# Altium schematic symbol library Centralize.SchLib: 1081 symbols (part 1 of 26)
Pins are listed as number, name and electrical type; pins without a type are passive.

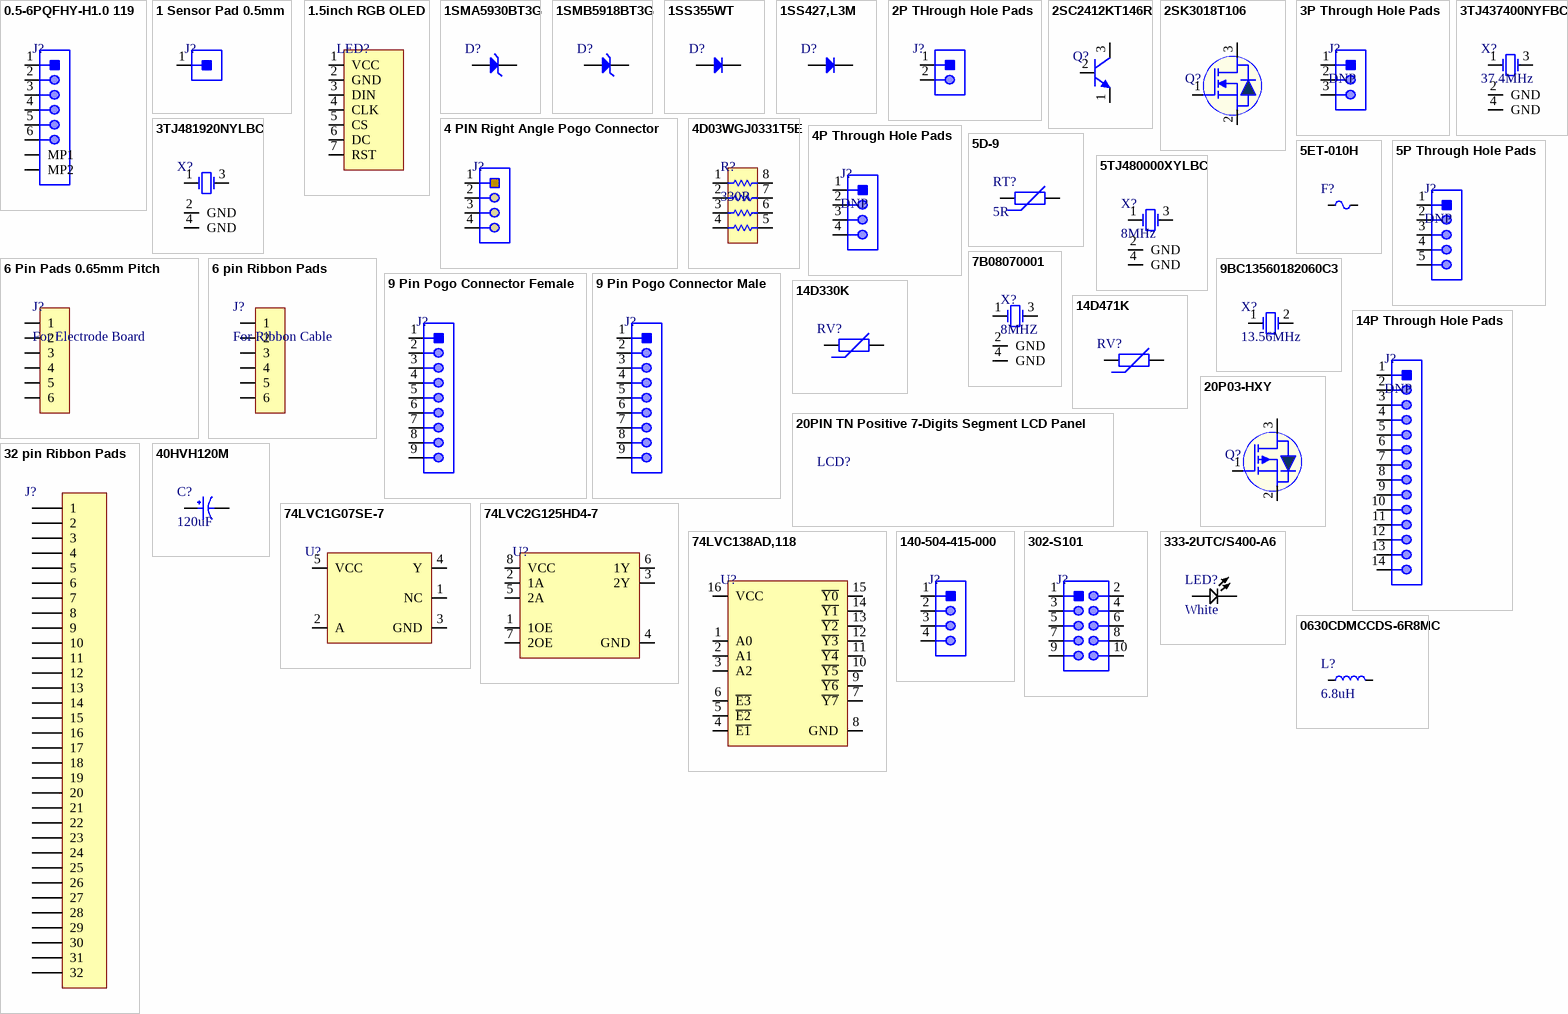
[diagram p0: symbols 0.5-6PQFHY-H1.0 119 to 0630CDMCCDS-6R8MC]

## 0.5-6PQFHY-H1.0 119
designator J?
Slide Lock -25℃~+85℃ 6 Double-sided contacts/up and down connection Surface Mount 0.5mm SMD,P=0.5mm FFC/FPC Connectors ROHS; Manufacturer: SHOU HAN; Manufacturer Part Number: 0.5-6PQFHY-H1.0 119; Package: SMD,P=0.5mm; LCSC Part Number: C2858296; Item Type: Connector; ComponentLink1Description: LCSC; ComponentLink1URL: https://www.lcsc.com/product-detail/FFC-span-style-background-color-ff0-FPC-span-Connectors_SHOU-HAN-0-5-6PQFHY-H1-0-119_C2858296.html
footprint 0.5-6PQFHY-H1.0 119
pins: 1, 2, 3, 4, 5, 6, MP1, MP2

## 1 Sensor Pad 0.5mm
designator J?
Wire Connecting Pad 0.5mm; Manufacturer Part Number: 1 Sensor Pad 0.5mm; Item Type: SMD Pad
footprint 1 Sensor Pad 0.5mm
pins: 1

## 1.5inch RGB OLED
designator LED?
1.5inch (128×128) SPI RGB OLED Display Module; Manufacturer: Waveshare; Manufacturer Part Number: 1.5inch RGB OLED Module; Item Type: OLED Module; Package: Custom; LCSC Part Number: *; ComponentLink1Description: Waveshare; ComponentLink1URL: https://www.waveshare.com/product/ai/1.5inch-rgb-oled-module.htm
footprint 1.5inch RGB OLED
pins: 1 VCC, 2 GND, 3 DIN, 4 CLK, 5 CS, 6 DC, 7 RST 

## 1SMA5930BT3G
designator D?
DIODE ZENER 16V 1.5W SMA; Manufacturer: onsemi; Manufacturer Part Number: 1SMA5930BT3G; Item Type: Zener diode; Package: SMA; LCSC Part Number: C128848; ComponentLink1Description: LCSC; ComponentLink1URL: https://www.lcsc.com/product-detail/Zener-Diodes_onsemi-1SMA5930BT3G_C128848.html
footprint SMA
pins: 1 K, 2 A

## 1SMB5918BT3G
designator D?
DIODE ZENER 5.1V 3W SMB; Manufacturer: ON Semiconductor; Manufacturer Part Number: 1SMB5918BT3G; Material: Plastic; Forward Voltage: 1.5V; Tolerance: 5%; Impedance: 4R; Max Reverse Leakage Current: 5uA; Zener Current: 294mA; Element Configuration: Single; Breakdown Voltage: 5.36V; Power Dissipation: 550mW; Test Current: 73.5mA; ESD Protection: Yes; Supplier 1: Digi-Key; RoHS: Yes; Category: Zener Diodes; Pricing 1: 1=0.47000, 10=0.35700, 100=0.22230, 500=0.15214, 1000=0.11702 (USD); Case/Package: SMB; Pins: 2; Contact Plating: Tin,Matte; Min Operating Temperature: -65°C; Max Operating Temperature: 150°C; Packaging: Tape and Reel; Max Power Dissipation: 3W; Package Quantity: 2500; Zener Voltage: 5.1V; Voltage Tolerance: 5%; Max Reverse Current: 5uA; Voltage Rating (DC): 5.1V; Power Rating: 3W; Series: -; Working Voltage: 5.1V; Length: 4.32mm; Width: 3.56mm; Height: 2.13mm; Radiation Hardening: No; Lead Free: Lead Free; Halogen Free: Halogen Free; Reach SVHC Compliant: Yes; RoHS Compliant: Yes; ComponentLink1URL: https://datasheet.ciiva.com/43573/1308322-43573724.pdf?src-supplier=Jameco; ComponentLink1Description: https://datasheet.ciiva.com/43573/1308322-43573724.pdf?src-supplier=Jameco; ComponentLink2URL: https://datasheet.ciiva.com/1182/1smb5913bt3-d-1182656.pdf?src-supplier=Element14; ComponentLink2Description: https://datasheet.ciiva.com/1182/1smb5913bt3-d-1182656.pdf?src-supplier=Element14; ComponentLink3URL: https://datasheet.ciiva.com/1182/1smb5913bt3-d-1182655.pdf?src-supplier=Element14; ComponentLink3Description: https://datasheet.ciiva.com/1182/1smb5913bt3-d-1182655.pdf?src-supplier=Element14; ComponentLink4URL: https://datasheet.ciiva.com/15198/getdatasheetpartid-301256-15198694.pdf?src-supplier=Verical; ComponentLink4Description: https://datasheet.ciiva.com/15198/getdatasheetpartid-301256-15198694.pdf?src-supplier=Verical; ComponentLink5URL: https://datasheet.ciiva.com/895/1smb5913bt3-d-895174.pdf?src-supplier=Digi-Key; ComponentLink5Description: https://datasheet.ciiva.com/895/1smb5913bt3-d-895174.pdf?src-supplier=Digi-Key; ComponentLink6URL: https://datasheet.ciiva.com/895/1smb5913bt3-d-895175.pdf?src-supplier=Digi-Key; ComponentLink6Description: https://datasheet.ciiva.com/895/1smb5913bt3-d-895175.pdf?src-supplier=Digi-Key; ComponentLink7URL: https://datasheet.ciiva.com/895/1smb5913bt3-d-895173.pdf?src-supplier=Digi-Key; ComponentLink7Description: https://datasheet.ciiva.com/895/1smb5913bt3-d-895173.pdf?src-supplier=Digi-Key; ComponentLink8URL: https://datasheet.ciiva.com/28461/1571994-28461349.pdf?src-supplier=Element14; ComponentLink8Description: https://datasheet.ciiva.com/28461/1571994-28461349.pdf?src-supplier=Element14; ComponentLink9URL: https://datasheet.ciiva.com/14559/70099466-14559627.pdf?src-supplier=Allied+Electronics; ComponentLink9Description: https://datasheet.ciiva.com/14559/70099466-14559627.pdf?src-supplier=Allied+Electronics; Supplier Part Number 1: 1SMB5918BT3GOSDKR-ND; LCSC Part Number: C142361; Item Type: Diode
footprint SMB_
pins: 1 A, 2 K

## 1SS355WT
designator D?
80V Single 1.2V@100mA 4ns 100mA SOD-523 Switching Diode ROHS; Manufacturer: CBI; Manufacturer Part Number: 1SS355WT; Package: SOD-523; LCSC Part Number: C2836063; Item Type: Diode; ComponentLink1Description: LCSC; ComponentLink1URL: https://www.lcsc.com/product-detail/Switching-Diode_CBI-1SS355WT_C2836063.html
footprint SOD-523 (SOD-523 Schottky Barrier Diodes (SBD) ROHS)
pins: 1 A, 2 K

## 1SS427,L3M
designator D?
DIODE GEN PURP 80V 100MA SOD923; Manufacturer: Toshiba; Manufacturer Part Number: 1SS427,L3M; Reverse Recovery Time: 1.6ns; Max Repetitive Reverse Voltage (Vrrm): 85V; Peak Non-Repetitive Surge Current: 1A; Item Type: Switching Diode; Supplier 1: Arrow Electronics; RoHS: Yes; Category: Rectifier Diodes; Stock 1: 22801; Pricing 1: 1=0.2509, 10=0.2033, 25=0.2013, 100=0.1061, 250=0.105, 500=0.0686, 1000=0.0432, 3000=0.0383, 6000=0.0352, 15000=0.0296 (USD); Mounting Technology: Surface Mount; Case/Package: SOD; Min Operating Temperature: -55°C; Max Operating Temperature: 150°C; Packaging: Cut Tape; Forward Current: 100mA; Average Rectified Current: 100mA; Max Reverse Voltage (DC): 80V; Series: -; RoHS Compliant: Yes; ComponentLink1URL: http://www.mouser.com/ds/2/408/1SS427_datasheet_en_20140708-708354.pdf?src-supplier=Mouser; ComponentLink1Description: http://www.mouser.com/ds/2/408/1SS427_datasheet_en_20140708-708354.pdf?src-supplier=Mouser; ComponentLink2URL: https://toshiba.semicon-storage.com/info/docget.jsp?did=11149&prodName=1SS427&src-supplier=Digi-Key; ComponentLink2Description: https://toshiba.semicon-storage.com/info/docget.jsp?did=11149&prodName=1SS427&src-supplier=Digi-Key; ComponentLink3URL: https://www.toshiba.com/taec/components2/datasheet_Sync/200802/DST_1SS427-TDE_EN_27790.pdf?src-supplier=Avnet; ComponentLink3Description: https://www.toshiba.com/taec/components2/datasheet_Sync/200802/DST_1SS427-TDE_EN_27790.pdf?src-supplier=Avnet; Supplier Part Number 1: 1SS427,L3M; LCSC Part Number: C146351
footprint SOD-923.
pins: 1 K, 2 A

## 2P THrough Hole Pads
designator J?
Wire Connecting Pad; Manufacturer Part Number: 2P THrough Hole Pads; Item Type: THrough Hole Pads
footprint 2P THrough Hole Pads
pins: 1, 2

## 2SC2412KT146R
designator Q?
TRANS NPN 50V 0.15A SOT-346; Manufacturer: Rohm; Manufacturer Part Number: 2SC2412KT146R; Max Power Dissipation: 200mW; Max Collector Current: 150mA; Collector Base Voltage (VCBO): 60V; hFE Min: 120; Transition Frequency: 180MHz; Emitter Base Voltage (VEBO): 7V; Collector Emitter Saturation Voltage: 400mV; Element Configuration: Single; Item Type: Mosfet; Supplier 1: Digi-Key; Stock 1: 44780; Pricing 1: 1=0.2, 10=0.184, 25=0.1748, 100=0.1, 500=0.06156, 1000=0.04198 (USD); Mount: Surface Mount; Case/Package: SMD/SMT; Number of Pins: 3; Contact Plating: Copper,Tin,Silver; Min Operating Temperature: -55°C; Max Operating Temperature: 150°C; Collector Emitter Voltage (VCEO): 50V; Packaging: Tape and Reel; Package Quantity: 3000; Polarity: NPN; Continuous Collector Current: 150mA; Collector Emitter Breakdown Voltage: 50V; Max Breakdown Voltage: 50V; Gain Bandwidth Product: 180MHz; Max Frequency: 180MHz; Voltage Rating (DC): 50V; Current Rating: 150mA; Length: 2.9mm; Width: 1.6mm; Height: 1.1mm; Radiation Hardening: No; REACH SVHC: No SVHC; Lead Free: Lead Free; RoHS Compliant: Yes; ComponentLink1URL: http://www.farnell.com/datasheets/1918636.pdf?src-supplier=Element14; ComponentLink1Description: http://www.farnell.com/datasheets/1918636.pdf?src-supplier=Element14; ComponentLink2URL: http://www.rohm.com/products/databook/tr/pdf/2sc2412k.pdf?src-supplier=Future+Electronics; ComponentLink2Description: http://www.rohm.com/products/databook/tr/pdf/2sc2412k.pdf?src-supplier=Future+Electronics; ComponentLink3URL: http://www.rohm.com/products/databook/tr/pdf/2sc2412k.pdf?src-supplier=Avnet+Europe; ComponentLink3Description: http://www.rohm.com/products/databook/tr/pdf/2sc2412k.pdf?src-supplier=Avnet+Europe; ComponentLink4URL: https://www.rohm.com/datasheet/2SC2412K/2sc4081u3t106r-e?src-supplier=Digi-Key; ComponentLink4Description: https://www.rohm.com/datasheet/2SC2412K/2sc4081u3t106r-e?src-supplier=Digi-Key; ComponentLink5URL: http://www.mouser.com/ds/2/348/2sc2412k-208972.pdf?src-supplier=Mouser; ComponentLink5Description: http://www.mouser.com/ds/2/348/2sc2412k-208972.pdf?src-supplier=Mouser; Supplier Part Number 1: 2SC2412KT146RCT-ND; LCSC Part Number: C111699
footprint SOT-346
pins: 1 E, 2 B, 3 C

## 2SK3018T106
designator Q?
MOSFET N-CH 30V .1A SOT-323; Manufacturer: Rohm; Manufacturer Part Number: 2SK3018T106; Rise Time: 35ns; Nominal Vgs: 1.5V; Rds On Max: 8R; Input Capacitance: 13pF; Continuous Drain Current (ID): 100mA; Power Dissipation: 200mW; Drain to Source Resistance: 7R; Turn-Off Delay Time: 80ns; Turn-On Delay Time: 15ns; Element Configuration: Single; Gate to Source Voltage (Vgs): 20V; On-State Resistance: 13R; Polarity: N-CHANNEL; Supplier 1: Digi-Key; RoHS: Yes; Category: MOSFETs; Stock 1: 35632; Pricing 1: 1=0.40000, 10=0.33100, 100=0.17560, 500=0.11550, 1000=0.07854 (USD); Mount: Surface Mount; Case/Package: SOT-323; Number of Pins: 3; Contact Plating: Copper,Tin,Silver; Min Operating Temperature: -55°C; Max Operating Temperature: 150°C; Package Quantity: 3000; Packaging: Tape and Reel; Dual Supply Voltage: 30V; Drain to Source Breakdown Voltage: 30V; Fall Time: 35ns; Drain to Source Voltage (Vdss): 30V; Max Power Dissipation: 200mW; Threshold Voltage: 1.5V; Termination: SMD/SMT; Voltage Rating (DC): 30V; Current Rating: 100mA; Drain-source On Resistance-Max: 13R; Series: -; Length: 2mm; Width: 1.25mm; Height: 0.8mm; Radiation Hardening: No; Reach SVHC Compliant: Yes; Lead Free: Lead Free; RoHS Compliant: Yes; ComponentLink1URL: https://datasheet.ciiva.com/16307/2sk3018-16307708.pdf?src-supplier=Future+Electronics; ComponentLink1Description: https://datasheet.ciiva.com/16307/2sk3018-16307708.pdf?src-supplier=Future+Electronics; ComponentLink2URL: https://datasheet.ciiva.com/13043/2sk3018-209190-13043441.pdf?src-supplier=Mouser; ComponentLink2Description: https://datasheet.ciiva.com/13043/2sk3018-209190-13043441.pdf?src-supplier=Mouser; ComponentLink3URL: https://datasheet.ciiva.com/1188/2sk3018-1188589.pdf?src-supplier=Element14; ComponentLink3Description: https://datasheet.ciiva.com/1188/2sk3018-1188589.pdf?src-supplier=Element14; ComponentLink4URL: https://datasheet.ciiva.com/934/2sk3018-934635.pdf?src-supplier=Digi-Key; ComponentLink4Description: https://datasheet.ciiva.com/934/2sk3018-934635.pdf?src-supplier=Digi-Key; ComponentLink5URL: https://datasheet.ciiva.com/934/2sk3018-934636.pdf?src-supplier=Digi-Key; ComponentLink5Description: https://datasheet.ciiva.com/934/2sk3018-934636.pdf?src-supplier=Digi-Key; LCSC Part Number: C113315; Item Type: Mosfet; Supplier Part Number 1: 2SK3018T106CT-ND
footprint SOT_323
pins: 1 G, 2 S, 3 D

## 3P Through Hole Pads
designator J?, comment DNP
Wire Connecting Pads; Manufacturer Part Number: 3P Through Hole Pads; Item Type: Through Hole Pads
footprint 3P Through Hole Pads
pins: 1, 2, 3

## 3TJ437400NYFBC
designator X?, comment 37.4MHz
37.4MHz SMD Crystal Resonator 12pF 60Ω SMD3225-4P Crystals ROHS; Manufacturer: JYJE; Manufacturer Part Number: 3TJ437400NYFBC; Value: 37.4MHz; Footprint: Custom; ComponentLink1Description: LCSC; ComponentLink1URL: https://lcsc.com/product-detail/Crystals_JYJE-3TJ437400NYFBC_C2149138.html; LCSC Part Number: C2149138; Item Type: Crystal
footprint 3TJ437400NYFBC_
pins: 1 OSC1, 2 GND, 3 OSC2, 4 GND

## 3TJ481920NYLBC
designator X?
8.192MHz SMD Crystal Resonator 12pF 150Ω SMD_3225_4P Crystals ROHS; Manufacturer: JYJE; Manufacturer Part Number: 3TJ481920NYLBC; Footprint: Custom; ComponentLink1Description: LCSC; ComponentLink1URL: https://lcsc.com/product-detail/Crystals_JYJE-3TJ481920NYLBC_C2898996.html; Value: 8.192MHz; LCSC Part Number: C2898996; Item Type: Crystal
footprint 3TJ481920NYLBC_
pins: 1 OSC1, 2 GND, 3 OSC2, 4 GND

## 4 PIN Right Angle Pogo Connector
designator J?
4pin spring loaded right angle bended pogo pin connectorPopular; Manufacturer Part Number: 4 PIN Right Angle Pogo Connector; Item Type: Pogo Conector; Package: Custom; LCSC Part Number: *
footprint 4 PIN Right Angle Pogo Connector
pins: 1, 2, 3, 4

## 4D03WGJ0331T5E
designator R?, comment 330R
4 8 ±5% 330Ω 62.5mW ±200ppm/℃ 0603x4 Resistor Networks & Arrays ROHS; Manufacturer: UNI-ROYAL(Uniroyal Elec); Manufacturer Part Number: 4D03WGJ0331T5E; Package: 0603x4; LCSC Part Number: C12018; Item Type: Resistor; ComponentLink1Description: LCSC; ComponentLink1URL: https://www.lcsc.com/product-detail/span-style-background-color-ff0-Resistor-span-Networks-Arrays_UNI-ROYAL-Uniroyal-Elec-4D03WGJ0331T5E_C12018.html
footprint Resistor 0603x4
pins: 1, 2, 3, 4, 5, 6, 7, 8

## 4P Through Hole Pads
designator J?, comment DNP
Wire Connecting Pads; Manufacturer Part Number: 4P Through Hole Pads; Item Type: Through Hole Pads
footprint 4P Through Hole Pads
pins: 1, 2, 3, 4

## 5D-9
designator RT?, comment 5R
5Ω 3A 2700K Plugin,P=7.5mm NTC Thermistors ROHS; Manufacturer: Hongzhi; Manufacturer Part Number: 5D-9; Package: Plugin,P=7.5mm; LCSC Part Number: C332361; Item Type: NTC Thermistor; ComponentLink1Description: LCSC; ComponentLink1URL: https://www.lcsc.com/product-detail/NTC-Thermistors_Hongzhi-Elec-5D-9_C332361.html
footprint 5D-9
pins: 1, 2

## 5ET-010H
designator F?
1A Plugin Fuses ROHS; Manufacturer: HOLLY; Manufacturer Part Number: 5ET-010H; Item Type: Fuse; Package: Plugin; ComponentLink1Description: LCSC; ComponentLink1URL: https://www.lcsc.com/product-detail/Fuses_HOLLY-5ET-010H_C356417.html; LCSC Part Number: C356417
footprint 5ET-010H
pins: 1, 2

## 5P Through Hole Pads
designator J?, comment DNP
Wire Connecting Pads; Manufacturer Part Number: 5P Through Hole Pads; Item Type: Through Hole Pads
footprint 5P Through Hole Pads
pins: 1, 2, 3, 4, 5

## 5TJ480000XYLBC
designator X?, comment 8MHz
8MHz 18pF ±10ppm SMD5032-4P Crystals ROHS; Manufacturer: JYJE; Manufacturer Part Number: 5TJ480000XYLBC; ComponentLink1Description: LCSC; ComponentLink1URL: https://www.lcsc.com/product-detail/Crystals_JYJE-5TJ480000XYLBC_C2149247.html; Package: SMD5032-4P; LCSC Part Number: C2149247; Item Type: Crystal
footprint 5TJ480000XYLBC_
pins: 1 OSC1, 2 GND, 3 OSC2, 4 GND

## 6 Pin Pads 0.65mm Pitch
designator J?, comment For Electrode Board
Ribbon wire Connection Pads 0.65mm Pitch
footprint 6 Pin Pads 0.65mm Pitch
pins: 1, 2, 3, 4, 5, 6

## 6 pin Ribbon Pads
designator J?, comment For Ribbon Cable
Ribbon wire Connection Pads 0.65mm Pitch
footprint 6 pin Ribbon Pads 0.65mm pitch
pins: 1, 2, 3, 4, 5, 6

## 7B08070001
designator X?, comment 8MHZ
CRYSTAL 8.0000MHZ 18PF SMD; Manufacturer: TXC; Manufacturer Part Number: 7B08070001; Frequency Stability: 20ppm; Supplier 1: Digi-Key; Stock 1: 0; Pricing 1: 1000=0.39 (USD); Mount: Surface Mount; Case/Package: SMD/SMT; Min Operating Temperature: -20°C; Max Operating Temperature: 75°C; Frequency: 8MHz; Load Capacitance: 18pF; Frequency Tolerance: 20ppm; Length: 0.197inch; Height: 0.041inch; Width: 0.126inch; ComponentLink1URL: http://www.txccorp.com/download/products/quartz_crystals/2015TXC_7B_19.pdf?src-supplier=Digi-Key; ComponentLink1Description: http://www.txccorp.com/download/products/quartz_crystals/2015TXC_7B_19.pdf?src-supplier=Digi-Key; ComponentLink2URL: http://www.mouser.com/ds/2/417/7b-5226.pdf?src-supplier=Mouser; ComponentLink2Description: http://www.mouser.com/ds/2/417/7b-5226.pdf?src-supplier=Mouser; Supplier Part Number 1: 7B08070001-ND; LCSC Part Number: C331620; Item Type: Crystal
footprint 7B08070001_
pins: 1 OSC1, 2 GND, 3 OSC2, 4 GND

## 9 Pin Pogo Connector Female
designator J?
3A Magnetic Pogo Pin Connector 9 pin; Manufacturer: RTLECS; Manufacturer Part Number: MG0922F-RA; Package: Custom; ComponentLink1Description: ALiexpress; ComponentLink1URL: https://vi.aliexpress.com/item/1005002669709542.html
footprint MG0922F-RA
pins: 1, 2, 3, 4, 5, 6, 7, 8, 9

## 9 Pin Pogo Connector Male
designator J?
3A Magnetic Pogo Pin Connector 9 pin; Manufacturer: RTLECS; Manufacturer Part Number: MG0922M-RA; Package: Custom; ComponentLink1Description: ALiexpress; ComponentLink1URL: https://vi.aliexpress.com/item/1005002669709542.html
footprint MG0922M-RA
pins: 1, 2, 3, 4, 5, 6, 7, 8, 9

## 9BC13560182060C3
designator X?, comment 13.56MHz
13.56MHz 49S Crystals 18pF 60Ω HC-49S-2P Crystals ROHS; Manufacturer: JGHC; Manufacturer Part Number: 9BC13560182060C3; Package: HC-49S-2P; LCSC Part Number: C2715873; ComponentLink1Description: LCSC; ComponentLink1URL: https://www.lcsc.com/product-detail/Crystals_JGHC-9BC13560182060C3_C2715873.html; Item Type: Crystal
footprint HC-49S-2P
pins: 1 OSC1, 2 OSC2

## 14D330K
designator RV?
65V 5.9J 8500pF@1kHz 26V 20V 30V~36V 1kA Radial Leaded Varistors ROHS; Manufacturer: SEMBO; Manufacturer Part Number: 14D330K; Item Type: Thermistor; Footprint: Plugin; ComponentLink1Description: LCSC; ComponentLink1URL: https://lcsc.com/product-detail/Varistors_Hongzhi-Elec-14D330K_C137829.html; LCSC Part Number: C782663
footprint 14D330K_
pins: 1, 2

## 14D471K
designator RV?
775V 385V 300V 423V~517V Plugin Varistors ROHS; Manufacturer: COV; Manufacturer Part Number: 14D471K; Package: Plugin; LCSC Part Number: C317828; Item Type: Varistor; ComponentLink1Description: LCSC; ComponentLink1URL: https://www.lcsc.com/product-detail/Varistors_COV-14D471K_C317828.html
footprint 14d471k
pins: 1, 2

## 14P Through Hole Pads
designator J?, comment DNP
Wire Connecting Pads; Manufacturer Part Number: 14P Through Hole Pads; Item Type: Through Hole Pads
footprint 14P Through Hole Pads_
pins: 1, 2, 3, 4, 5, 6, 7, 8, 9, 10, 11, 12, 13, 14

## 20P03-HXY
designator Q?
30V 20A 29W 39mΩ@10V,15A 2.5V@250uA P Channel 1345pF@15V TO-252-2L MOSFETs ROHS; Manufacturer: HXY MOSFET; Manufacturer Part Number: 20P03-HXY; Item Type: Mosfet; Package: TO-252-2L; LCSC Part Number: C4748750; ComponentLink1Description: LCSC; ComponentLink1URL: https://www.lcsc.com/product-detail/MOSFETs_HXY-MOSFET-20P03-HXY_C4748750.html
footprint 20P03-HXY
pins: 1 G, 2 S, 3 D

## 20PIN TN Positive 7-Digits Segment LCD Panel
designator LCD?
7-Digits Segment LCD Panel Temperature Humidity LCD Screen No Backlight; Manufacturer Part Number: 20PIN Temperature Humidity LCD Screen; Item Type: LCD Panel; ComponentLink1Description: Aliexpress; ComponentLink1URL: https://vi.aliexpress.com/item/1005003044245683.html?gatewayAdapt=glo2vnm#nav-specification

## 32 pin Ribbon Pads
designator J?
Ribbon wire Connection Pads
footprint 32 pin Ribbon Pads.
pins: 1, 2, 3, 4, 5, 6, 7, 8, 9, 10, 11, 12, 13, 14, 15, 16, 17, 18, 19, 20, 21, 22, 23, 24, 25, 26, 27, 28, 29, 30, 31, 32

## 40HVH120M
designator C?, comment 120uF
40V 120uF Polymer ±20% 18mΩ@100kHz 12.5mm 2.75A@100kHz 10mm -55℃~+105℃ 10000hrs@105℃ SMD,10x12.5mm Solid Capacitors ROHS; Manufacturer: SUNCON; Manufacturer Part Number: 40HVH120M; Package: SMD,10x12.5mm; LCSC Part Number: C569699; ComponentLink1Description: LCSC; ComponentLink1URL: https://www.lcsc.com/product-detail/Solid-Capacitors_SUNCON-SUN-Elec-Industries-40HVH120M_C569699.html; Item Type: Capacitor
footprint 40HVH120M (SMD,10x12.5mm)
pins: 1, 2

## 74LVC1G07SE-7
designator U?
IC BUF NON-INVERT 5.5V SOT353; Manufacturer: Diodes; Manufacturer Part Number: 74LVC1G07SE-7; Logic Function: Buffer,Inverting; Polarity: Inverting,Non-Inverting; Number of Gates: 1; Min Supply Voltage: 1.65V; Propagation Delay: 8.5ns; Low Level Output Current: 32mA; Operating Supply Current: 10uA; Quiescent Current: 200uA; Supplier 1: Digi-Key; Stock 1: 3369; Pricing 1: 1=0.28, 10=0.228, 25=0.1908, 100=0.1208, 250=0.09328, 500=0.0795, 1000=0.05406 (USD); Mount: Surface Mount; Case/Package: SOT-353; Number of Pins: 5; Min Operating Temperature: -40°C; Max Operating Temperature: 85°C; Number of Inputs: 1; Max Supply Voltage: 5.5V; Packaging: Tape and Reel; Package Quantity: 3000; Number of Elements: 1; Number of Channels: 1; Number of Outputs: 1; Number of Input Lines: 1; Number of Output Lines: 1; Number of Bits per Element: 1; Turn-On Delay Time: 8.5ns; Series: 74LVC; Technology: CMOS; Length: 2.2mm; Width: 1.35mm; Height: 1mm; Radiation Hardening: No; REACH SVHC: No SVHC; Lead Free: Lead Free; RoHS Compliant: Yes; ComponentLink1URL: http://www.farnell.com/datasheets/2238488.pdf?src-supplier=Element14; ComponentLink1Description: http://www.farnell.com/datasheets/2238488.pdf?src-supplier=Element14; ComponentLink2URL: http://www.diodes.com/datasheets/74LVC1G07.pdf?src-supplier=Avnet; ComponentLink2Description: http://www.diodes.com/datasheets/74LVC1G07.pdf?src-supplier=Avnet; ComponentLink3URL: https://www.verical.com/server-webapp/html/getDatasheet?partID=302086&src-supplier=Verical; ComponentLink3Description: https://www.verical.com/server-webapp/html/getDatasheet?partID=302086&src-supplier=Verical; ComponentLink4URL: http://www.diodes.com//datasheets/74LVC1G07.pdf?src-supplier=Avnet+Europe; ComponentLink4Description: http://www.diodes.com//datasheets/74LVC1G07.pdf?src-supplier=Avnet+Europe; ComponentLink5URL: http://www.diodes.com///datasheets/74LVC1G07.pdf?src-supplier=Avnet; ComponentLink5Description: http://www.diodes.com///datasheets/74LVC1G07.pdf?src-supplier=Avnet; ComponentLink6URL: https://www.diodes.com/assets/Datasheets/74LVC1G07.pdf?src-supplier=Digi-Key; ComponentLink6Description: https://www.diodes.com/assets/Datasheets/74LVC1G07.pdf?src-supplier=Digi-Key; Supplier Part Number 1: 74LVC1G07SE-7DICT-ND; Item Type: IC
footprint SOT-353_
pins: 1 NC, 2 A, 3 GND, 4 Y, 5 VCC

## 74LVC2G125HD4-7
designator U?
IC BUFFER NON-INVERT 5.5V 8DFN; Manufacturer: Diodes; Manufacturer Part Number: 74LVC2G125HD4-7; Logic Function: Buffer,Inverting; Number of Elements: 2; Number of Bits per Element: 1; High Level Output Current: 32mA; Supplier 1: Digi-Key; RoHS: Yes; Category: Logic Gates; Pricing 1: 1=0.47000, 10=0.35300, 25=0.30880, 100=0.19980, 250=0.16536, 500=0.13228, 1000=0.10142, 2500=0.08819 (USD); Mount: Surface Mount; Number of Pins: 8; Min Operating Temperature: -40°C; Max Operating Temperature: 125°C; Packaging: Tape and Reel; Low Level Output Current: 32mA; RoHS Compliant: Yes; ComponentLink1URL: https://www.diodes.com/assets/Datasheets/74LVC2G125.pdf?src-supplier=Digi-Key; ComponentLink1Description: https://www.diodes.com/assets/Datasheets/74LVC2G125.pdf?src-supplier=Digi-Key; Supplier Part Number 1: 74LVC2G125HD4-7DIDKR-ND; LCSC Part Number: C151599; Item Type: IC
footprint X2-DFN2010-8
pins: 1 1OE, 2 1A, 3 2Y, 4 GND, 5 2A, 6 1Y, 7 2OE, 8 VCC

## 74LVC138AD,118
designator U?
IC DECODER/DEMUX 3-8 INV 16SOIC; Manufacturer: Nexperia; Manufacturer Part Number: 74LVC138AD,118; Supplier 1: Avnet; RoHS: Yes; Category: Decoders and Multiplexers; Stock 1: 17684; Pricing 1: 2995=0.11690, 3000=0.11440, 6000=0.11189, 15000=0.10939, 30000=0.10688, 150000=0.10438, 300000=0.10187 (USD); RoHS Compliant: Yes; Supplier Part Number 1: 74LVC138AD,118; LCSC Part Number: C6061; Item Type: IC; ComponentLink1Description: LCSC; ComponentLink1URL: https://www.lcsc.com/product-detail/Signal-Switches-Encoders-Decoders-Multiplexers_Nexperia-74LVC138AD-118_C6061.html
footprint 16-SOIC
pins: 1 A0, 2 A1, 3 A2, 4 ~{E1}, 5 ~{E2}, 6 ~{E3}, 7 ~{Y7}, 8 GND, 9 ~{Y6}, 10 ~{Y5}, 11 ~{Y4}, 12 ~{Y3}, 13 ~{Y2}, 14 ~{Y1}, 15 ~{Y0}, 16 VCC

## 140-504-415-000
designator J?
2.0MM PITCH CONNECTOR WITH 4 P.C; Manufacturer: EDAC; Manufacturer Part Number: 140-504-415-000; Item Type: JST Connector; Supplier 1: Digi-Key; RoHS: No; Category: Connectors; Stock 1: 4727; Pricing 1: 1=0.17000, 10=0.14200, 25=0.12600, 50=0.11760, 100=0.10920, 250=0.09660, 500=0.09240, 1000=0.07560, 2500=0.06930 (USD); Supplier Part Number 1: 151-140-504-415-000-ND
footprint 140-504-415-000_
pins: 1, 2, 3, 4

## 302-S101
designator J?
CONN HEADER VERT 10POS 2.54MM; Manufacturer: On-Shore Technology; Manufacturer Part Number: 302-S101; Number of Positions: 10; Connector Type: Male Pin; Pitch: 0.1inch; Item Type: Shrouded Header; Supplier 1: Digi-Key; Stock 1: 23093; Pricing 1: 1=0.28, 10=0.265, 100=0.1856, 500=0.15908, 1000=0.13256, 5000=0.11362, 10000=0.10605 (USD); Mount: Through Hole; Color: Black; Contact Plating: Gold; Number of Rows: 2; Packaging: Tray; Termination: Solder; Series: 302; Contact Type: Male Pin; Row Spacing: 0.1inch; ComponentLink1URL: http://www.on-shore.com/wp-content/uploads/2018/04/302-SXX1.pdf?src-supplier=Digi-Key; ComponentLink1Description: http://www.on-shore.com/wp-content/uploads/2018/04/302-SXX1.pdf?src-supplier=Digi-Key; Supplier Part Number 1: ED1543-ND
footprint 302-S101_
pins: 1, 2, 3, 4, 5, 6, 7, 8, 9, 10

## 333-2UTC/S400-A6
designator LED?, comment White
Colorless transparence -40℃~+85℃ White light 15° 100mW Plugin,D=5mm Light Emitting Diodes (LED) ROHS; Manufacturer: Everlight Elec; Manufacturer Part Number: 333-2UTC/S400-A6; Package: Plugin,D=5mm; LCSC Part Number: C99695; Item Type: LED; ComponentLink1Description: LCSC; ComponentLink1URL: https://www.lcsc.com/product-detail/Light-Emitting-Diodes-LED_Everlight-Elec-333-2UTC-S400-A6_C99695.html
footprint TH LED 5mm_
pins: 1 -, 2 +

## 0630CDMCCDS-6R8MC
designator L?, comment 6.8uH
FIXED IND 6.8UH 5A 48 MOHM SMD; Manufacturer: Sumida; Manufacturer Part Number: 0630CDMCCDS-6R8MC; Core Material: Metal; Saturation Current: 6.3A; Shielding: Shielded; DC Resistance (DCR): 48mR; Test Frequency: 100kHz; Tolerance: 20%; Item Type: Inductor; Supplier 1: Digi-Key; Stock 1: 1582; Pricing 1: 1=0.97, 10=0.845, 25=0.7848, 50=0.6642, 100=0.6038, 250=0.56752, 500=0.50716 (USD); Mount: Surface Mount; Case/Package: Nonstandard; Min Operating Temperature: -55°C; Max Operating Temperature: 125°C; Packaging: Tape and Reel; Inductance: 6.8uH; Current Rating: 5A; Length: 0.276inch; Width: 0.26inch; Height - Seated (Max): 0.118inch; RoHS Compliant: Yes; ComponentLink1URL: http://products.sumida.com/products/pdf/0630CDMCDDS.pdf?src-supplier=Digi-Key; ComponentLink1Description: http://products.sumida.com/products/pdf/0630CDMCDDS.pdf?src-supplier=Digi-Key; Supplier Part Number 1: 308-2467-1-ND; LCSC Part Number: C167295
footprint 0630CDMCCDS_6R8MC
pins: 1, 2

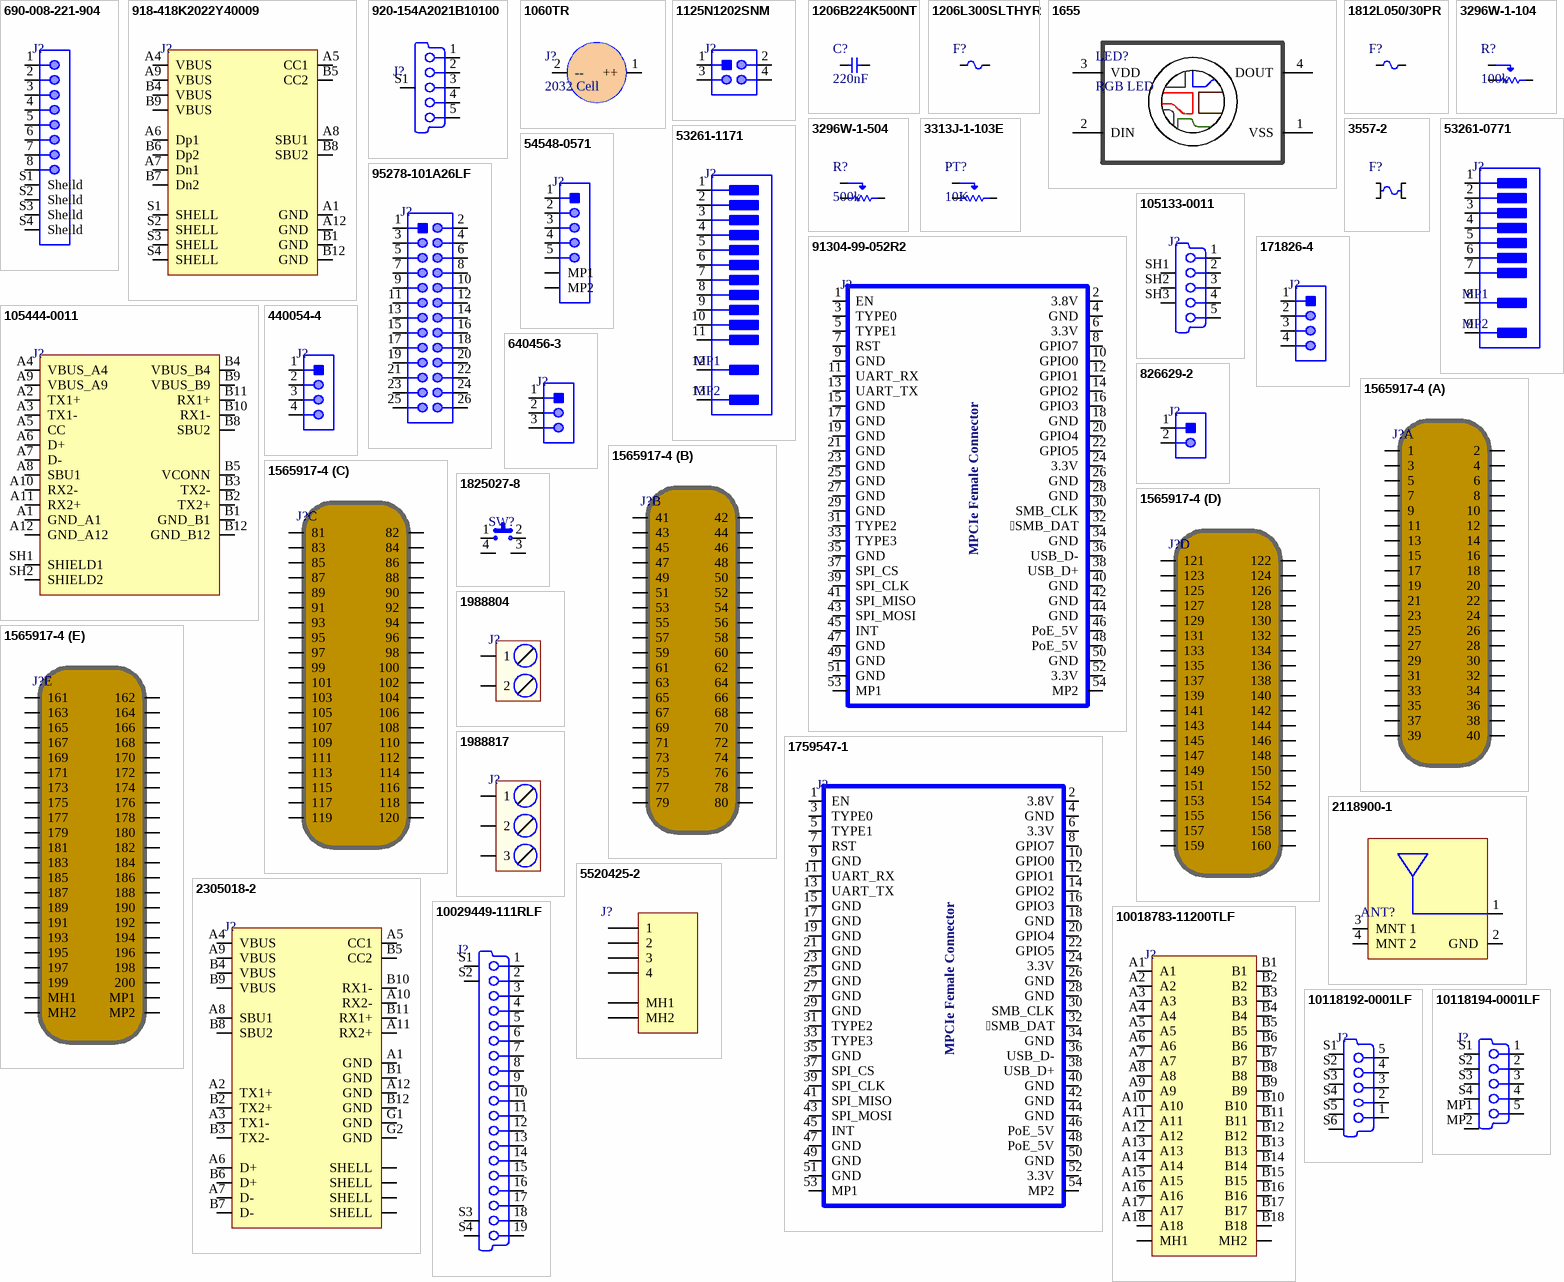
[diagram p1: symbols 690-008-221-904 to 10118194-0001LF]

## 690-008-221-904
designator J?
Socket; USB A; THT; angled 90°; double; USB 2.0; gold-plated; Manufacturer Part Number: 690-008-221-904; Manufacturer: EDAC; Item Type: USB A Conncetor; ComponentLink1Description: Digikey; ComponentLink1URL: https://www.digikey.com/en/products/detail/edac-inc/690-008-221-013/1299805
footprint 690-008-221-904_
pins: 1, 2, 3, 4, 5, 6, 7, 8, S1 Sheild, S2 Sheild, S3 Sheild, S4 Sheild

## 918-418K2022Y40009
designator J?
USB 3.1 1 Brick nogging 16 Female Type-C SMD USB Connectors ROHS; Manufacturer: Jing Extension; Manufacturer Part Number: 918-418K2022Y40009; Item Type: USB C Connector; Package: Custom; LCSC Part Number: C2763102; ComponentLink1Description: LCSC; ComponentLink1URL: https://www.lcsc.com/product-detail/USB-Connectors_Jing-Extension-of-the-Electronic-Co-918-418K2022Y40009_C2763102.html
footprint 918-418K2022Y40009
pins: A1 GND (power), A4 VBUS (power), A5 CC1, A6 Dp1, A7 Dn1, A8 SBU1, A9 VBUS (power), A12 GND (power), B1 GND (power), B4 VBUS (power), B5 CC2, B6 Dp2, B7 Dn2, B8 SBU2, B9 VBUS (power), B12 GND (power), S1 SHELL, S2 SHELL, S3 SHELL, S4 SHELL

## 920-154A2021B10100
designator J?
1A USB 2.0 1 Board Edge, Straddle Mount 5P Female -30℃~+80℃ Micro-B - USB Connectors ROHS; Manufacturer: Jing Extension of the Electronic Co.; Manufacturer Part Number: 920-154A2021B10100; Item Type: Micro-B Connector; Package: Custom; LCSC Part Number: C69072; ComponentLink1Description: LCSC; ComponentLink1URL: https://www.lcsc.com/product-detail/USB-Connectors_Jing-Extension-of-the-Electronic-Co-920-154A2021B10100_C69072.html
footprint 920-154A2021B10100
pins: 1 V BUS (5V) "USB Vcc [Red]", 2 D- "USB Data - [White]", 3 D+ "USB Data + [Green]", 4 ID "Not Connected (or joined to pin 5 via resistor)", 5 GND "Ground [Black]", S1 Shield "Shell"

## 1060TR
designator J?, comment 2032 Cell
BATTERY HOLDER COIN 20MM SMD; Manufacturer: Keystone Electronics; Manufacturer Part Number: 1060; Body Material: Glass,Liquid Crystal Polymer; Number of Contacts: 2; Number of Batteries: 1; Approvals: UL; Item Type: Coin Cell Holder; ComponentLink1URL: https://www.distrelec.biz/Web/Downloads/02/32/06950232.pdf?mime=application%2Fpdf&src-supplier=Distrelec; ComponentLink1Description: https://www.distrelec.biz/Web/Downloads/02/32/06950232.pdf?mime=application%2Fpdf&src-supplier=Distrelec; ComponentLink2URL: http://www.farnell.com/datasheets/1769533.pdf?src-supplier=Element14; ComponentLink2Description: http://www.farnell.com/datasheets/1769533.pdf?src-supplier=Element14; ComponentLink3URL: http://www.keyelco.com/product-pdf.cfm?p=726&src-supplier=Digi-Key; ComponentLink3Description: http://www.keyelco.com/product-pdf.cfm?p=726&src-supplier=Digi-Key; ComponentLink4URL: http://www.mouser.com/ds/2/215/060-745916.pdf?src-supplier=Mouser; ComponentLink4Description: http://www.mouser.com/ds/2/215/060-745916.pdf?src-supplier=Mouser; ComponentLink5URL: http://www.rapidonline.com/pdf/18-3627.pdf?src-supplier=Rapid+Electronics; ComponentLink5Description: http://www.rapidonline.com/pdf/18-3627.pdf?src-supplier=Rapid+Electronics; ComponentLink6URL: http://uk.rs-online.com/webdocs/1152/0900766b811529cb.pdf?src-supplier=RSComponents; ComponentLink6Description: http://uk.rs-online.com/webdocs/1152/0900766b811529cb.pdf?src-supplier=RSComponents; ComponentLink7URL: http://www.keyelco.com/userAssets/file/M60-2p4.pdf?src-supplier=Future+Electronics; ComponentLink7Description: http://www.keyelco.com/userAssets/file/M60-2p4.pdf?src-supplier=Future+Electronics; Supplier 1: Digi-Key; Stock 1: 11504; Pricing 1: 1=1.53, 25=1.4208, 100=1.08, 250=0.95352, 500=0.88136, 1000=0.82388, 2500=0.74724, 5000=0.68976 (USD); Mount: Surface Mount,PCB; Color: White; Contact Material: Bronze,Gold; Material: Bronze; Min Operating Temperature: -50°C; Max Operating Temperature: 145°C; Packaging: Tray; Package Quantity: 1; Termination: SMD/SMT; Number of Cells: 1; Diameter: 20mm; Lead Free: Lead Free; REACH SVHC: No SVHC; Supplier Part Number 1: 36-1060-ND; LCSC Part Number: C238069
footprint 1060TR_
pins: 1 ++, 2 --

## 1125N1202SNM
designator J?
CONN HEADER 4 POS 2.54mm SMD; Manufacturer: RTLECS; Manufacturer Part Number: 1125N1202SNM; Connector type: Pin header Male SMT; Pitch: 2.54; Current rating: 3 A; Item Type: Header; ComponentLink1Description: LCSC; ComponentLink1URL: https://m.id.aliexpress.com/i/32727363517.html
footprint 1125N1202SNM. (CONN HEADER 4 POS 2.54mm SMD)
pins: 1, 2, 3, 4

## 1206B224K500NT
designator C?, comment 220nF
50V 220nF X7R ±10% 1206 Multilayer Ceramic Capacitors MLCC - SMD/SMT ROHS; Manufacturer: FH; Manufacturer Part Number: 1206B224K500NT; Package: 1206; LCSC Part Number: C1857; Item Type: Capacitor; ComponentLink1Description: LCSC; ComponentLink1URL: https://www.lcsc.com/product-detail/Multilayer-Ceramic-Capacitors-MLCC-SMD-SMT_FH-Guangdong-Fenghua-Advanced-Tech-1206B224K500NT_C1857.html
footprint Cap-1206 (SMD 1206)
pins: 1, 2

## 1206L300SLTHYR
designator F?
PTC RESET FUSE 6V 3A 1206; Manufacturer: Littelfuse; Manufacturer Part Number: 1206L300SLTHYR; Max Current Rating: 50A; Resistance: 20mR; Power Dissipation: 800mW; Trip Current: 6A; Time to Trip: 4s; Approvals: UL,TUV; Supplier 1: Arrow Electronics; RoHS: Yes; Category: PTC Resettable Fuses; Stock 1: 4000; Pricing 1: 4000=0.60290 (USD); Case/Package: 1206; Case Code (Metric): 3216; Case Code (Imperial): 1206; Min Operating Temperature: -40°C; Max Operating Temperature: 85°C; Package Quantity: 4000; Packaging: Tape and Reel; Termination: SMD/SMT; Max Voltage Rating (DC): 6V; Hold Current: 3A; Voltage Rating (DC): 6V; Operating Supply Voltage: 6V; Series: POLY-FUSE®, LoRho™; Lead Free: Lead Free; RoHS Compliant: Yes; ComponentLink1URL: https://datasheet.ciiva.com/7438/littelfuse-lorho-ptc-7438567.pdf?src-supplier=Digi-Key; ComponentLink1Description: https://datasheet.ciiva.com/7438/littelfuse-lorho-ptc-7438567.pdf?src-supplier=Digi-Key; ComponentLink2URL: https://datasheet.ciiva.com/7438/littelfuse-lorho-ptc-7438569.pdf?src-supplier=Digi-Key; ComponentLink2Description: https://datasheet.ciiva.com/7438/littelfuse-lorho-ptc-7438569.pdf?src-supplier=Digi-Key; ComponentLink3URL: https://datasheet.ciiva.com/7438/littelfuse-lorho-ptc-7438565.pdf?src-supplier=Digi-Key; ComponentLink3Description: https://datasheet.ciiva.com/7438/littelfuse-lorho-ptc-7438565.pdf?src-supplier=Digi-Key; Supplier Part Number 1: 1206L300SLTHYR; LCSC Part Number: C207041; Item Type: Fuse
footprint Fuse 1206 (3216 Metric) (0.126" L x 0.062" W x 0.026" H (3.20mm x 1.58mm x 0.65mm))
pins: 1, 2

## 1655
designator LED?, comment RGB LED
ADDRESS LED DISC SERIAL RGB 1=10; Manufacturer: Adafruit Industries; Manufacturer Part Number: 1655; Color: Blue,Green,Red; Number of LEDs: 10; Item Type: RGB-LED; Supplier 1: Digi-Key; Stock 1: 2943; Mount: Surface Mount; Length: 5mm; Width: 5mm; ComponentLink1URL: https://cdn-shop.adafruit.com/product-files/1138/SK6812+LED+datasheet+.pdf?src-supplier=Digi-Key; ComponentLink1Description: https://cdn-shop.adafruit.com/product-files/1138/SK6812+LED+datasheet+.pdf?src-supplier=Digi-Key; ComponentLink2URL: http://www.mouser.com/ds/2/737/SK6812_LED_datasheet_-953546.pdf?src-supplier=Mouser; ComponentLink2Description: http://www.mouser.com/ds/2/737/SK6812_LED_datasheet_-953546.pdf?src-supplier=Mouser; Supplier Part Number 1: 1528-1104-ND; Pricing 1: 1=4.5 (USD)
footprint 1655 (RGB LED)
pins: 1 VSS, 2 DIN, 3 VDD, 4 DOUT

## 1812L050/30PR
designator F?
PTC RESET FUSE 30V 500MA 1812; Manufacturer: Littelfuse; Manufacturer Part Number: 1812L050/30PR; Max Current Rating: 100A; Value: 1R; Power Dissipation: 800mW; Trip Current: 1A; Time to Trip: 150ms; Approvals: cULus,TUV; Supplier: Future Electronics; Supplier Part Number: 6020221; RoHS: Yes; Category: PTC Resettable Fuses; Stock: 78000; Pricing: 2000=0.405, 4000=0.395, 6000=0.39, 10000=0.385, 20000=0.375 (USD); Mounting Technology: Surface Mount; Case/Package: 1812; Case Code (Metric): 4532; Case Code (Imperial): 1812; Min Operating Temperature: -40°C; Max Operating Temperature: 85°C; Packaging: Tape and Reel; Current Rating: 100A; Package Quantity: 2000; Termination: SMD/SMT; Max Voltage Rating (DC): 30V; Working Voltage: 30V; Voltage Rating (DC): 30V; Hold Current: 500mA; Series: POLY-FUSE®, 1812L; Lead Free: Lead Free; RoHS Compliant: Yes; Reach SVHC Compliant: Unknown; ComponentLink1URL: https://datasheet.ciiva.com/16499/littelfuse-ptc-1812l-16499880.pdf?src-supplier=Future+Electronics; ComponentLink1Description: https://datasheet.ciiva.com/16499/littelfuse-ptc-1812l-16499880.pdf?src-supplier=Future+Electronics; ComponentLink2URL: https://datasheet.ciiva.com/12544/littelfuse-ptc-1812l-12544459.pdf?src-supplier=Mouser; ComponentLink2Description: https://datasheet.ciiva.com/12544/littelfuse-ptc-1812l-12544459.pdf?src-supplier=Mouser; ComponentLink3URL: https://datasheet.ciiva.com/326/littelfuse-ptc-1812l-326063.pdf?src-supplier=Digi-Key; ComponentLink3Description: https://datasheet.ciiva.com/326/littelfuse-ptc-1812l-326063.pdf?src-supplier=Digi-Key; ComponentLink4URL: https://datasheet.ciiva.com/326/littelfuse-ptc-1812l-326064.pdf?src-supplier=Digi-Key; ComponentLink4Description: https://datasheet.ciiva.com/326/littelfuse-ptc-1812l-326064.pdf?src-supplier=Digi-Key; ComponentLink5URL: https://datasheet.ciiva.com/326/littelfuse-ptc-1812l-326065.pdf?src-supplier=Digi-Key; ComponentLink5Description: https://datasheet.ciiva.com/326/littelfuse-ptc-1812l-326065.pdf?src-supplier=Digi-Key; LCSC Part Number: C151168; Item Type: Fuse
footprint 1812-FUSE (13.2V 2.6A 40A 800mW -40?~+85? 5.2A 10mO 2.5s 50mO 1812 Resettable Fuses ROHS)
pins: 1, 2

## 3296W-1-104
designator R?, comment 100k
Trimmer, Cermet, Rest 100 Kilohms, PCB, 25 Turns, Pwr-Rtg 0.5W, 3296 Series; Manufacturer: BOCHEN(Chengdu Guosheng Tech); Manufacturer Part Number: 3296W-1-104; Item Type: Potentiometer; LCSC Part Number: C330435; Value: 100k; ComponentLink1Description: LCSC; ComponentLink1URL: https://www.lcsc.com/product-detail/Variable-Resistors-Potentiometers_BOCHEN-Chengdu-Guosheng-Tech-3296W-1-104_C330435.html
footprint 3296W_
pins: 1 CCW, 2 Wiper, 3 CW

## 3296W-1-504
designator R?, comment 500k
Res Cermet Trimmer 500K Ohm 10% 1/2W 25(Elec)Turn; Manufacturer: BOCHEN(Chengdu Guosheng Tech); Manufacturer Part Number: 3296W-1-504; Item Type: Potentiometer; LCSC Part Number: C330437; ComponentLink1Description: LCSC; ComponentLink1URL: https://www.lcsc.com/product-detail/Variable-Resistors-Potentiometers_BOCHEN-Chengdu-Guosheng-Tech-3296W-1-504_C330437.html; Value: 500k
footprint 3296W_
pins: 1 CCW, 2 Wiper, 3 CW

## 3313J-1-103E
designator PT?, comment 10K
TRIMMER 10KOHM 0.125W J LEAD TOP; Manufacturer: Bourns; Manufacturer Part Number: 3313J-1-103E; Value: 10kR; Tolerance: 20%; Power Rating: 125mW; Number of Turns: 1; Temperature Coefficient: 100ppm/°C; Insulation Resistance: 100MR; Voltage Rating (DC): 500V; Item Type: Potentiometer; Supplier 1: Digi-Key; RoHS: Yes; Category: Variable Resistors and Potentiometers; Stock 1: 15653; Pricing 1: 1=1.83, 10=1.611, 25=1.4444, 50=1.3888, 100=1.3332, 250=1.27764, 500=1.05544 (USD); Mounting Technology: Surface Mount; Weight: 283mg; Color: Natural; Min Operating Temperature: -55°C; Max Operating Temperature: 125°C; Resistor Type: Cermet; Package Quantity: 1000; Packaging: Tape and Reel; Termination: J-Hook; Taper: Linear; Max Power Dissipation: 125mW; Type: Potentiometer; Series: Trimpot® 3313 - Sealed; Resistance Tolerance: 20%; Technology: CERMET; Length: 3.2mm; Width: 3.2mm; Height: 2.2mm; Depth: 3.5mm; Radiation Hardening: No; Reach SVHC Compliant: No; Military Standard: Not; Lead Free: Lead Free; RoHS Compliant: Yes; ComponentLink1URL: https://datasheet.ciiva.com/6197/1719390-6197392.pdf?src-supplier=Farnell; ComponentLink1Description: https://datasheet.ciiva.com/6197/1719390-6197392.pdf?src-supplier=Farnell; ComponentLink2URL: https://datasheet.ciiva.com/11831/0900766b80dbb89c-11831555.pdf?src-supplier=Rs; ComponentLink2Description: https://datasheet.ciiva.com/11831/0900766b80dbb89c-11831555.pdf?src-supplier=Rs; ComponentLink3URL: https://datasheet.ciiva.com/43573/1157501-43573718.pdf?src-supplier=Jameco; ComponentLink3Description: https://datasheet.ciiva.com/43573/1157501-43573718.pdf?src-supplier=Jameco; ComponentLink4URL: https://datasheet.ciiva.com/7953/1864507-7953225.pdf?src-supplier=Element14; ComponentLink4Description: https://datasheet.ciiva.com/7953/1864507-7953225.pdf?src-supplier=Element14; ComponentLink5URL: https://datasheet.ciiva.com/28659/1770668-28659191.pdf?src-supplier=Element14; ComponentLink5Description: https://datasheet.ciiva.com/28659/1770668-28659191.pdf?src-supplier=Element14; ComponentLink6URL: https://datasheet.ciiva.com/2156/3313-2156355.pdf?src-supplier=Digi-Key; ComponentLink6Description: https://datasheet.ciiva.com/2156/3313-2156355.pdf?src-supplier=Digi-Key; ComponentLink7URL: https://datasheet.ciiva.com/2156/3313-2156356.pdf?src-supplier=Digi-Key; ComponentLink7Description: https://datasheet.ciiva.com/2156/3313-2156356.pdf?src-supplier=Digi-Key; ComponentLink8URL: https://datasheet.ciiva.com/2156/3313-2156354.pdf?src-supplier=Digi-Key; ComponentLink8Description: https://datasheet.ciiva.com/2156/3313-2156354.pdf?src-supplier=Digi-Key; ComponentLink9URL: https://datasheet.ciiva.com/16715/70153423-16715693.pdf?src-supplier=Allied+Electronics; ComponentLink9Description: https://datasheet.ciiva.com/16715/70153423-16715693.pdf?src-supplier=Allied+Electronics; Supplier Part Number 1: 3313J-103ECT-ND; LCSC Part Number: C124616
footprint 3313J-1-103E
pins: 1 CCW, 2 Wiper, 3 CW

## 3557-2
designator F?
FUSE BLOCK BLADE 500V 30A PCB; Manufacturer: Keystone Electronics; Manufacturer Part Number: 3557-2; Color: Black; Material: Brass,Tin,Nylon; Current Rating: 20A; Number of Circuits: 1; Illumination Type: Illuminated; Fuse Type: Automotive; Fuse Size: ATO, ATC, or Mini ATO, ATC; Item Type: Fuse Holder; Supplier 1: Future Electronics; RoHS: Yes; Category: Fuse Holders; Stock 1: 129820; Pricing 1: 1=0.72500, 75=0.69000, 250=0.66500, 750=0.64000, 2500=0.59000 (USD); Mount: Vertical,PCB,Through Hole; Contact Plating: Tin; Contact Material: Brass; Min Operating Temperature: -50°C; Max Operating Temperature: 145°C; Package Quantity: 1; Series: -; Termination: PC Pin; Orientation: Vertical; Voltage Rating (AC): 500V; Voltage: 500V; Number of Poles: 1; Fuse Current: 20A; Length: 19.8mm; Depth: 6.8mm; Size: 0.265inch; Lead Free: Lead Free; Reach SVHC Compliant: Yes; Flammability Rating: UL94 V-0; Supplier Part Number 1: 6424071; LCSC Part Number: C352820; ComponentLink1Description: LCSC; ComponentLink1URL: https://www.lcsc.com/search?q=3557-2
footprint 3557-2
pins: 1, 2, 3, 4

## 53261-0771
designator J?
CONN HEADER SMD R/A 7POS 1.25MM; Manufacturer: Molex; Manufacturer Part Number: 53261-0771; Body Plating: Tin; Contact Resistance: 20mR; Number of Contacts: 7; Current Rating: 1A; Voltage Rating: 125V; Insulation Resistance: 100MR; Item Type: Wire To Wire Connector; Supplier 1: Mouser; RoHS: Yes; Category: Headers and Wire Housings; Stock 1: 27199; Pricing 1: 1=0.83, 10=0.688, 50=0.688, 100=0.574, 1000=0.504, 10000=0.419 (USD); Mounting Technology: Surface Mount; Color: Natural; Contact Plating: Tin; Contact Material: Bronze,Brass,Tin; Housing Color: Natural; Housing Material: Nylon; Min Operating Temperature: -40°C; Max Operating Temperature: 85°C; Packaging: Tape and Reel; Termination: Solder; Orientation: Right Angle; Series: PicoBlade; Number of Rows: 1; Number of Positions: 7; Contact Type: Blade Pin; Contact Gender: Male; Voltage Rating (AC): 125V; Working Voltage: 125V; Length: 13.9mm; Pitch: 1.25mm; Lead Pitch: 1.25mm; Depth: 5.2mm; RoHS Compliant: Yes; Flammability Rating: UL94 V-0; Reach SVHC Compliant: Unknown; ComponentLink1URL: https://datasheet.ciiva.com/392/532610371-sd-392113.pdf?src-supplier=Digi-Key; ComponentLink1Description: https://datasheet.ciiva.com/392/532610371-sd-392113.pdf?src-supplier=Digi-Key; ComponentLink2URL: https://datasheet.ciiva.com/11747/0900766b8078fc7d-11747893.pdf?src-supplier=Rs; ComponentLink2Description: https://datasheet.ciiva.com/11747/0900766b8078fc7d-11747893.pdf?src-supplier=Rs; ComponentLink3URL: https://datasheet.ciiva.com/392/532610771-sd-392145.pdf?src-supplier=Digi-Key; ComponentLink3Description: https://datasheet.ciiva.com/392/532610771-sd-392145.pdf?src-supplier=Digi-Key; ComponentLink4URL: https://datasheet.ciiva.com/392/532610771-sd-392146.pdf?src-supplier=Digi-Key; ComponentLink4Description: https://datasheet.ciiva.com/392/532610771-sd-392146.pdf?src-supplier=Digi-Key; Supplier Part Number 1: 538-53261-0771; LCSC Part Number: C505276
footprint 53261-0771
pins: 1, 2, 3, 4, 5, 6, 7, 8 MP1, 9 MP2

## 53261-1171
designator J?
CONN HEADER SMD R/A 11POS 1.25MM; Manufacturer: Molex; Manufacturer Part Number: 53261-1171; Number of Contacts: 11; Current Rating: 1A; Voltage Rating: 125V; Insulation Resistance: 100MR; Gender: Male; Glow Wire Compliant: Non-compliant; Item Type: Wire To Board Connector; Supplier 1: Mouser; RoHS: Yes; Category: Headers and Wire Housings; Stock 1: 3128; Pricing 1: 1=1.24, 10=1.01, 50=1.01, 100=0.852, 1000=0.662, 10000=0.572 (USD); Contact Plating: Tin; Contact Material: Bronze,Brass,Tin; Housing Material: Thermoplastic; Color: Natural; Number of Rows: 1; Termination: SMD/SMT; Packaging: Tape and Reel; Orientation: Right Angle; Contact Gender: Male; Number of Positions: 11; Number of Circuits: 11; Voltage Rating (DC): 125V; Series: PicoBlade; Height: 3.4mm; Pitch: 1.25mm; Lead Pitch: 1.25mm; Lead Free: Lead Free; Flammability Rating: UL94 V-0; RoHS Compliant: Yes; Reach SVHC Compliant: Unknown; ComponentLink1URL: https://datasheet.ciiva.com/5158/0532611171-pcb-headers-170916-5158048.pdf?src-supplier=Mouser; ComponentLink1Description: https://datasheet.ciiva.com/5158/0532611171-pcb-headers-170916-5158048.pdf?src-supplier=Mouser; ComponentLink2URL: https://datasheet.ciiva.com/16657/0532611171-pcb-headers-16657840.pdf?; ComponentLink2Description: https://datasheet.ciiva.com/16657/0532611171-pcb-headers-16657840.pdf?; Supplier Part Number 1: 538-53261-1171; LCSC Part Number: C585957
footprint 53261-1171
pins: 1, 2, 3, 4, 5, 6, 7, 8, 9, 10, 11, 12 MP1, 13 MP2

## 54548-0571
designator J?
0.5 FPC ZIF HSG ASSY 5CKT EMBSTP; Manufacturer: Molex; Manufacturer Part Number: 54548-0571; Number of Contacts: 5; Voltage Rating: 50V; Current Rating: 500mA; Gender: Female; Stackable: No; Pitch: 0.5mm; Item Type: FPC Connector; Supplier 1: Mouser; RoHS: Yes; Category: FFC / FPC; Stock 1: 15599; Pricing 1: 1=1.26000, 10=1.04000, 50=1.04000, 100=0.86300, 1000=0.69000, 10000=0.58700 (USD); Contact Material: Bronze; Contact Plating: Gold; Material: Bronze; Housing Material: Thermoplastic; Number of Rows: 1; Termination: SMD/SMT; Orientation: Right Angle; Package Quantity: 3000; Packaging: Tape and Reel; Number of Positions: 5; Number of Circuits: 5; Series: 54548; Radiation Hardening: No; Reach SVHC Compliant: Yes; ELV: Compliant; RoHS Compliant: Yes; ComponentLink1URL: https://datasheet.ciiva.com/5137/0545480571-ffc-fpc-connectors-228778-5137871.pdf?src-supplier=Mouser; ComponentLink1Description: https://datasheet.ciiva.com/5137/0545480571-ffc-fpc-connectors-228778-5137871.pdf?src-supplier=Mouser; Supplier Part Number 1: 538-54548-0571
footprint 54548-0571
pins: 1, 2, 3, 4, 5, MP1, MP2

## 91304-99-052R2
designator J?
0.8mm mPCI-E Surface Mount 52 SMD,P=0.8mm Card Edge Connectors ROHS; Manufacturer: UMAX; Manufacturer Part Number: 91304-99-052R2; Item Type: mPCI-E Connector; ComponentLink1Description: LCSC; ComponentLink1URL: https://www.lcsc.com/product-detail/Card-Edge-Connectors_UMAX-91304-99-052R2_C404126.html; Package: SMD,P=0.8mm; LCSC Part Number: C404126
footprint 91304-99-052R2
pins: 1 EN, 2 3.8V, 3 TYPE0, 4 GND, 5 TYPE1, 6 3.3V, 7 RST, 8 GPIO7, 9 GND, 10 GPIO0, 11 UART_RX, 12 GPIO1, 13 UART_TX, 14 GPIO2, 15 GND, 16 GPIO3, 17 GND, 18 GND, 19 GND, 20 GPIO4, 21 GND, 22 GPIO5, 23 GND, 24 3.3V, 25 GND, 26 GND, 27 GND, 28 GND, 29 GND, 30 SMB_CLK, 31 TYPE2, 32 SMB_DAT, 33 TYPE3, 34 GND, 35 GND, 36 USB_D-, 37 SPI_CS, 38 USB_D+, 39 SPI_CLK, 40 GND, 41 SPI_MISO, 42 GND, 43 SPI_MOSI, 44 GND, 45 INT, 46 PoE_5V, 47 GND, 48 PoE_5V, 49 GND, 50 GND, 51 GND, 52 3.3V, 53 MP1, 54 MP2
text: MPCIe Female Connector

## 95278-101A26LF
designator J?
CONN HEADER SMD 26POS 2.54MM; Manufacturer: Amphenol ICC (FCI); Manufacturer Part Number: 95278-101A26LF; Item Type: Male Header; Package: Custom; ComponentLink1Description: New link; ComponentLink1URL: https://www.digikey.com/en/products/detail/amphenol-icc-fci/95278-101A26LF/1488594; LCSC Part Number: C60131
footprint 95278-101A26LF. (CONN HEADER SMD 26POS 2.54MM)
pins: 1, 2, 3, 4, 5, 6, 7, 8, 9, 10, 11, 12, 13, 14, 15, 16, 17, 18, 19, 20, 21, 22, 23, 24, 25, 26